# Altium footprint library SnapEDApcb.PcbLib: 1 footprints
Each footprint in its own frame and in the unit in brackets; x right, y up, seen from the top. Pads: shape width x height; smd on the part's side, far side on the other; paste and mask are expansions set on the pad; w line width, h text height; cw(c..) or ccw(c..) is an arc to the next point about the centre after c.
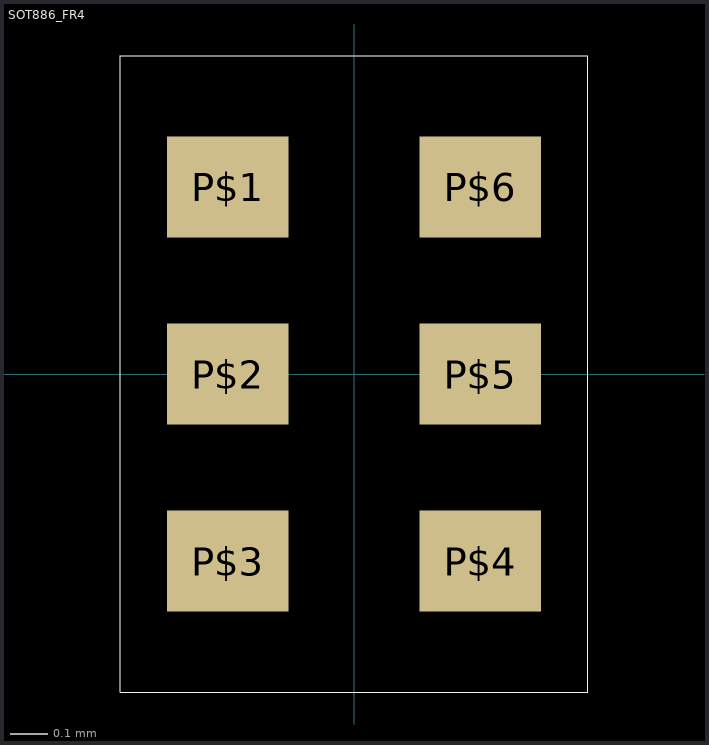
[diagram p0: the footprint, top view; thin cyan lines are the x and y axes]

## SOT886_FR4 [mm]
pads (6):
  rect 0.325x0.27 smd paste-1 mask+0: P$1(-0.337,0.5) P$2(-0.337,0) P$3(-0.337,-0.5) P$4(0.337,-0.5) P$5(0.337,0) P$6(0.337,0.5)
Top Overlay:
  lines w0: -0.625,-0.85 -0.625,0.85 0.625,0.85 0.625,-0.85 -0.625,-0.85
Top Paste:
  region: -0.175,-0.135 -0.5,-0.135 -0.5,0.135 -0.175,0.135
  region: -0.175,0.365 -0.5,0.365 -0.5,0.635 -0.175,0.635
  region: -0.175,-0.635 -0.5,-0.635 -0.5,-0.365 -0.175,-0.365
  region: 0.5,0.365 0.175,0.365 0.175,0.635 0.5,0.635
  region: 0.5,-0.135 0.175,-0.135 0.175,0.135 0.5,0.135
  region: 0.5,-0.635 0.175,-0.635 0.175,-0.365 0.5,-0.365
Top Solder:
  region: -0.125,-0.185 -0.55,-0.185 -0.55,0.185 -0.125,0.185
  region: -0.125,0.315 -0.55,0.315 -0.55,0.685 -0.125,0.685
  region: -0.125,-0.685 -0.55,-0.685 -0.55,-0.315 -0.125,-0.315
  region: 0.55,0.315 0.125,0.315 0.125,0.685 0.55,0.685
  region: 0.55,-0.185 0.125,-0.185 0.125,0.185 0.55,0.185
  region: 0.55,-0.685 0.125,-0.685 0.125,-0.315 0.55,-0.315